# Altium footprint library HIL_project.PcbLib: 26 footprints (part 1 of 2)
Each footprint in its own frame and in the unit in brackets; x right, y up, seen from the top. Pads: shape width x height; smd on the part's side, far side on the other; paste and mask are expansions set on the pad; w line width, h text height; cw(c..) or ccw(c..) is an arc to the next point about the centre after c.
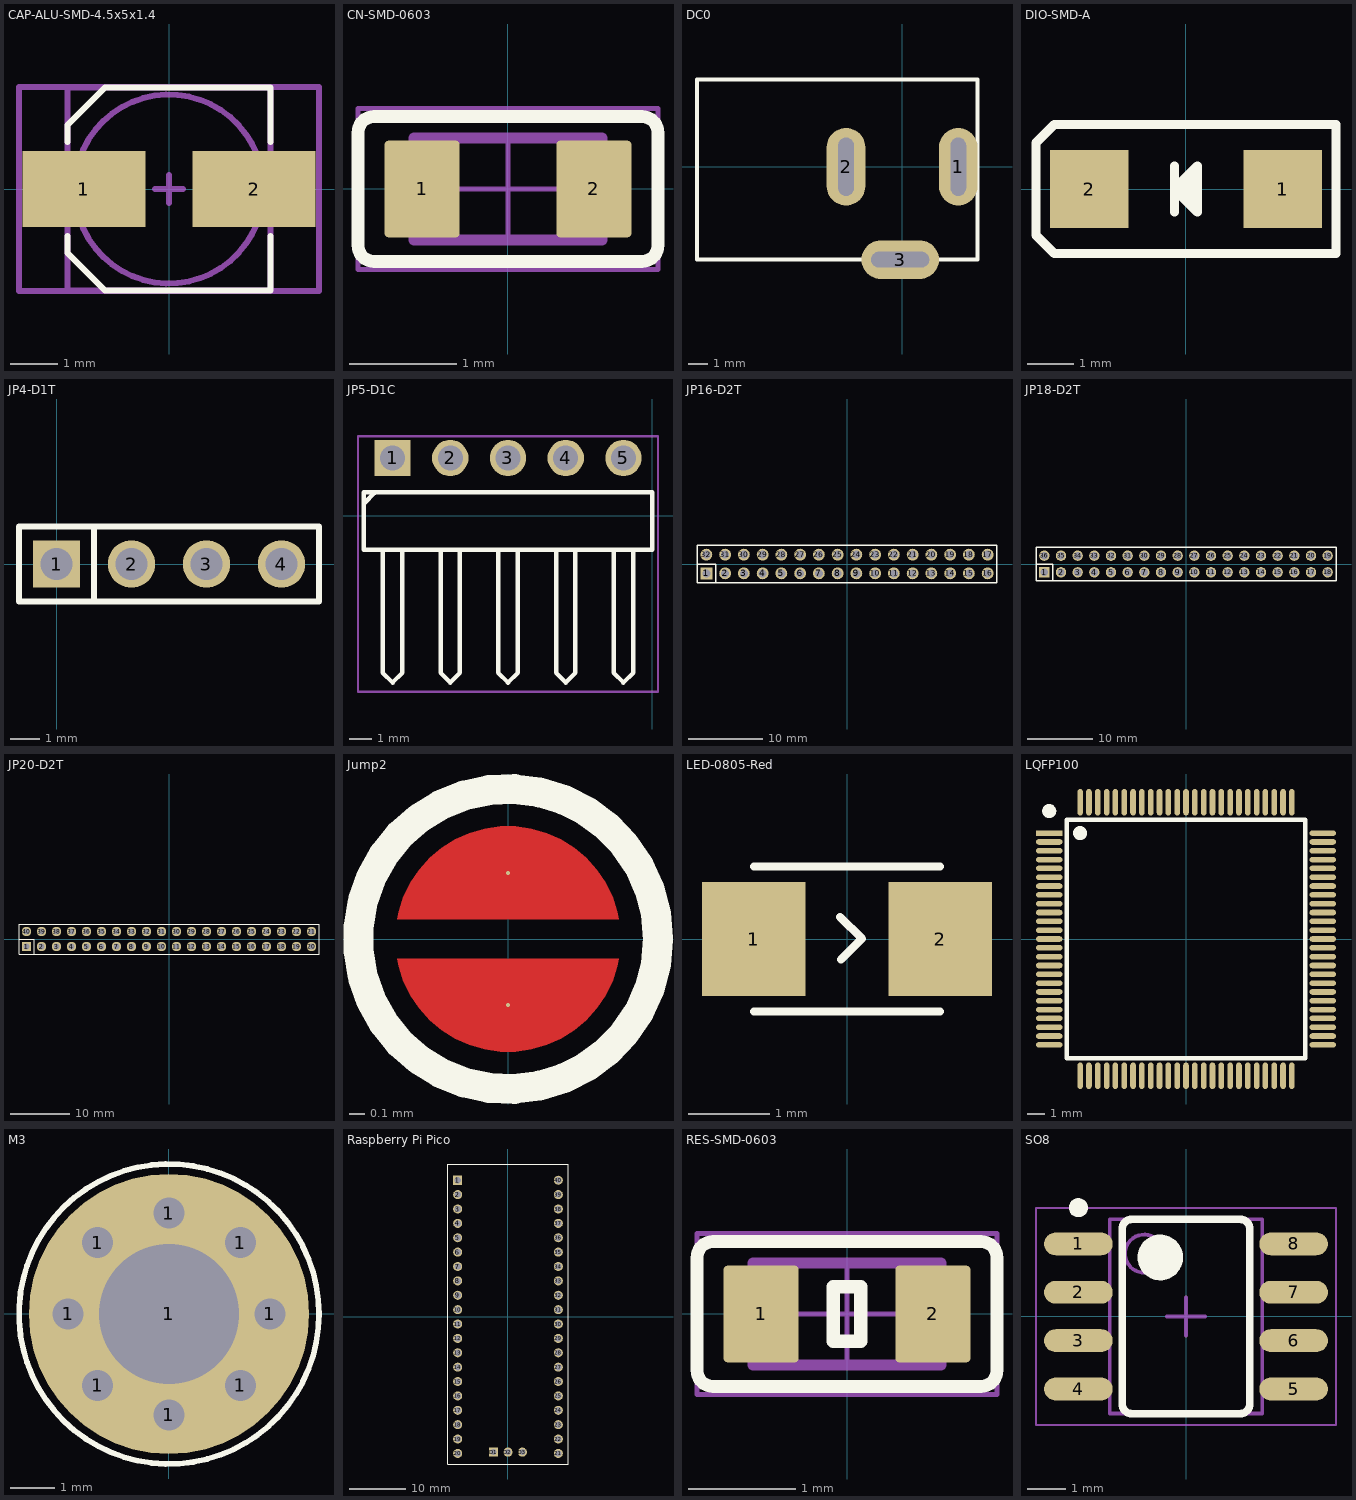
[diagram p0: the footprints below, top view; thin cyan lines are the x and y axes]

## CAP-ALU-SMD-4.5x5x1.4 [mm]
height 5.5
pads (2):
  rect 2.6x1.6 smd: 1(-1.8,0) 2(1.8,0)
Top Overlay:
  lines w0.127: -2.15,-1 -2.15,-1.35 -1.35,-2.15 2.15,-2.15 2.15,-1 ; -2.15,1 -2.15,1.35 -1.35,2.15 2.15,2.15 2.15,1
Mechanical 13:
  circle w0.127: c0,0 r2
  lines w0.127: -2.15,-2.15 -2.15,2.15 2.15,2.15 2.15,-2.15 -2.15,-2.15
Mechanical 15:
  lines w0.127: -0.3,0 0.3,0 ; 0,-0.3 0,0.3 ; -3.175,-2.159 -3.175,2.159 3.175,2.159 3.175,-2.159 -3.175,-2.159
3D body "4x5.5x1.stp": height 5.45, standoff -0.05, extent -2.5,-2.15 2.5,2.15

## CN-SMD-0603 [mm]
pads (2):
  rrect10% 0.7x0.9 smd: 1(-0.8,0) 2(0.8,0)
Top Overlay:
  lines w0.12: -1.397,-0.525 ccw(c-1.247,-0.525) -1.247,-0.675 1.247,-0.675 ccw(c1.247,-0.525) 1.397,-0.525 1.397,0.525 ccw(c1.247,0.525) 1.247,0.675 -1.247,0.675 ccw(c-1.247,0.525) -1.397,0.525 -1.397,-0.525
Mechanical 13:
  lines w0.1: -0.875,-0.475 0.875,-0.475 0.875,0.475 -0.875,0.475 -0.875,-0.475
Mechanical 15:
  lines w0.05: -0.475,0 0.475,0 ; 0,-0.475 0,0.475 ; -1.397,-0.75 1.397,-0.75 1.397,0.75 -1.397,0.75 -1.397,-0.75
3D body "User Library-0603 SMD Capacitor.step": height 0.3, standoff 0, extent -0.8,-0.4 0.8,0.4

## DC0 [mm] "Jac DC input"
height 5.08
pads (3):
  oval 2x4 hole 0.8 slot 3 at 90 deg: 1(2.9,0) 2(-2.9,0)
  oval 4x2 hole 0.8 slot 3 at 0 deg: 3(-0.1,-4.8)
Top Overlay:
  lines w0.2: -2.1,-4.8 -10.6,-4.8 -10.6,4.5 3.9,4.5 3.9,-4.8 1.9,-4.8
3D body "694106301002.stp": height 10.7, standoff -3.8, extent -10.6,-4.9 3.9,4.5

## DIO-SMD-A [mm]
pads (2):
  rect 1.7x1.7 smd: 1(2.1,0) 2(-2.1,0)
Top Overlay:
  region: 0.25,0.5 0.25,-0.5 -0.25,0
  lines w0.2: -0.25,-0.5 -0.25,0.5 ; -3.25,-1 -3.25,1 -2.85,1.4 3.25,1.4 3.25,-1.4 -2.85,-1.4 -3.25,-1 ; -0.25,0 0.25,0.5 0.25,-0.5 -0.25,0
Mechanical 1:
  lines w0.1: -0.2,0 0.2,0 ; 0,-0.2 0,0.2
3D body "User Library-DO-214Aa SMA.step": height 2.4, standoff 0, extent -2.6,-1.3 2.6,1.3

## JP4-D1T [mm] "4 pins, 1 row, straight, gold plating"
height 8.54
pads (4):
  rect 1.6x1.6 hole 1.1: 1(0,0)
  round 1.6 hole 1.1: 2(2.54,0) 3(5.08,0) 4(7.62,0)
Top Overlay:
  lines w0.2: 1.27,-1.27 1.27,1.27 ; -1.27,-1.27 -1.27,1.27 8.89,1.27 8.89,-1.27 -1.27,-1.27
3D body "61300411121.stp": height 8.54, standoff -3, extent -1.27,-1.27 8.89,1.27

## JP5-D1C [mm] "5 pins, 1 row, right angled, gold plating"
height 2.54
pads (5):
  rect 1.6x1.6 hole 1.1: 1(-11.43,2.54)
  round 1.6 hole 1.1: 2(-8.89,2.54) 3(-6.35,2.54) 4(-3.81,2.54) 5(-1.27,2.54)
Top Overlay:
  lines w0.2: -12.658,0.574 -12.234,0.998 ; -11.853,-1.525 -11.853,-6.919 -11.43,-7.342 -11.007,-6.919 -11.007,-1.5 ; -9.313,-1.525 -9.313,-6.919 -8.89,-7.342 -8.467,-6.919 -8.467,-1.525 ; -6.773,-1.525 -6.773,-6.919 -6.35,-7.342 -5.927,-6.919 -5.927,-1.5 ; -4.233,-1.525 -4.233,-6.919 -3.81,-7.342 -3.387,-6.919 -3.387,-1.525 ; -1.693,-1.525 -1.693,-6.919 -1.27,-7.342 -0.847,-6.919 -0.847,-1.5 ; -12.7,-1.5 0,-1.5 0,1.04 -12.7,1.04 -12.7,-1.5
Mechanical 15:
  lines w0.1: -12.95,-7.75 -12.95,3.5 0.25,3.5 0.25,-7.75 -12.95,-7.75
3D body "61300511021.stp": height 2.55, standoff -2.99, extent -12.7,-7.524 0,2.836

## JP16-D2T [mm] "32 pins, dual pin, straight, gold plating"
height 8.54
pads (32):
  rect 1.6x1.6 hole 1.1: 1(-19.05,-1.27)
  round 1.6 hole 1.1: 2(-16.51,-1.27) 3(-13.97,-1.27) 4(-11.43,-1.27) 5(-8.89,-1.27) 6(-6.35,-1.27) 7(-3.81,-1.27) 8(-1.27,-1.27) 9(1.27,-1.27) 10(3.81,-1.27) 11(6.35,-1.27) 12(8.89,-1.27) 13(11.43,-1.27) 14(13.97,-1.27) 15(16.51,-1.27) 16(19.05,-1.27) 17(19.05,1.27) 18(16.51,1.27) 19(13.97,1.27) 20(11.43,1.27) 21(8.89,1.27) 22(6.35,1.27) 23(3.81,1.27) 24(1.27,1.27) 25(-1.27,1.27) 26(-3.81,1.27) 27(-6.35,1.27) 28(-8.89,1.27) 29(-11.43,1.27) 30(-13.97,1.27) 31(-16.51,1.27) 32(-19.05,1.27)
Top Overlay:
  lines w0.2: -20.32,0 -17.78,0 -17.78,-2.54 ; -20.32,-2.54 -20.32,2.54 20.32,2.54 20.32,-2.54 -20.32,-2.54
3D body "61303221121.stp": height 8.55, standoff -2.99, extent -20.32,-2.54 20.32,2.54

## JP18-D2T [mm] "36 pins, dual pin, straight, gold plating"
height 8.54
pads (36):
  rect 1.6x1.6 hole 1.1: 1(-21.59,-1.27)
  round 1.6 hole 1.1: 2(-19.05,-1.27) 3(-16.51,-1.27) 4(-13.97,-1.27) 5(-11.43,-1.27) 6(-8.89,-1.27) 7(-6.35,-1.27) 8(-3.81,-1.27) 9(-1.27,-1.27) 10(1.27,-1.27) 11(3.81,-1.27) 12(6.35,-1.27) 13(8.89,-1.27) 14(11.43,-1.27) 15(13.97,-1.27) 16(16.51,-1.27) 17(19.05,-1.27) 18(21.59,-1.27) 19(21.59,1.27) 20(19.05,1.27) 21(16.51,1.27) 22(13.97,1.27) 23(11.43,1.27) 24(8.89,1.27) 25(6.35,1.27) 26(3.81,1.27) 27(1.27,1.27) 28(-1.27,1.27) 29(-3.81,1.27) 30(-6.35,1.27) 31(-8.89,1.27) 32(-11.43,1.27) 33(-13.97,1.27) 34(-16.51,1.27) 35(-19.05,1.27) 36(-21.59,1.27)
Top Overlay:
  lines w0.2: -22.86,0 -20.32,0 -20.32,-2.54 ; -22.86,-2.54 -22.86,2.54 22.86,2.54 22.86,-2.54 -22.86,-2.54
3D body "61303621121.stp": height 8.55, standoff -2.99, extent -22.86,-2.54 22.86,2.54

## JP20-D2T [mm] "40 pins, dual pin, straight, gold plating"
height 8.54
pads (40):
  rect 1.6x1.6 hole 1.1: 1(-24.13,-1.27)
  round 1.6 hole 1.1: 2(-21.59,-1.27) 3(-19.05,-1.27) 4(-16.51,-1.27) 5(-13.97,-1.27) 6(-11.43,-1.27) 7(-8.89,-1.27) 8(-6.35,-1.27) 9(-3.81,-1.27) 10(-1.27,-1.27) 11(1.27,-1.27) 12(3.81,-1.27) 13(6.35,-1.27) 14(8.89,-1.27) 15(11.43,-1.27) 16(13.97,-1.27) 17(16.51,-1.27) 18(19.05,-1.27) 19(21.59,-1.27) 20(24.13,-1.27) 21(24.13,1.27) 22(21.59,1.27) 23(19.05,1.27) 24(16.51,1.27) 25(13.97,1.27) 26(11.43,1.27) 27(8.89,1.27) 28(6.35,1.27) 29(3.81,1.27) 30(1.27,1.27) 31(-1.27,1.27) 32(-3.81,1.27) 33(-6.35,1.27) 34(-8.89,1.27) 35(-11.43,1.27) 36(-13.97,1.27) 37(-16.51,1.27) 38(-19.05,1.27) 39(-21.59,1.27) 40(-24.13,1.27)
Top Overlay:
  lines w0.2: -25.4,0 -22.86,0 -22.86,-2.54 ; -25.4,-2.54 25.4,-2.54 25.4,2.54 -25.4,2.54 -25.4,-2.54
3D body "61304021121.stp": height 8.55, standoff -2.99, extent -25.4,-2.54 25.4,2.54

## Jump2 [mil]
pads (2):
  round 1 smd: 1(0,17.33) 2(0,-17.33)
Top Layer:
  region: -29.08,5.13 -28.72,7.16 -27.44,11.09 -25.63,14.8 -23.32,18.22 -20.56,21.29 -17.4,23.95 -13.9,26.13 -10.12,27.81 -6.15,28.95 -2.06,29.53 2.06,29.53 6.15,28.95 10.12,27.81 13.9,26.13 17.4,23.95 20.56,21.29 23.32,18.22 25.63,14.8 27.44,11.09 28.72,7.16 29.08,5.13
  region: 29.08,-5.13 28.72,-7.16 27.44,-11.09 25.63,-14.8 23.32,-18.22 20.56,-21.29 17.4,-23.95 13.9,-26.13 10.12,-27.81 6.15,-28.95 2.06,-29.53 -2.06,-29.53 -6.15,-28.95 -10.12,-27.81 -13.9,-26.13 -17.4,-23.95 -20.56,-21.29 -23.32,-18.22 -25.63,-14.8 -27.44,-11.09 -28.72,-7.16 -29.08,-5.13
Top Overlay:
  circle w7.87: c0,0 r39.37

## LED-0805-Red [mil]
pads (2):
  rect 50x55 smd: 1(-45,0) 2(45,0)
Top Overlay:
  lines w3.94: -3.34,10.66 7.16,0.16 ; -2.91,-9.91 6.91,-0.09
  lines w4: -45,-35 45,-35 ; -45,35 45,35
3D body "User Library-led_0805-red.step": height 43.31, standoff 0, extent -39.76,-24.6 39.77,24.61

## LQFP100 [mm]
pads (100):
  rect 1.5x0.32 smd: 1(-7.75,6)
  oval 1.5x0.32 smd: 2(-7.75,5.5) 3(-7.75,5) 4(-7.75,4.5) 5(-7.75,4) 6(-7.75,3.5) 7(-7.75,3) 8(-7.75,2.5) 9(-7.75,2) 10(-7.75,1.5) 11(-7.75,1) 12(-7.75,0.5) 13(-7.75,0) 14(-7.75,-0.5) 15(-7.75,-1) 16(-7.75,-1.5) 17(-7.75,-2) 18(-7.75,-2.5) 19(-7.75,-3) 20(-7.75,-3.5) 21(-7.75,-4) 22(-7.75,-4.5) 23(-7.75,-5) 24(-7.75,-5.5) 25(-7.75,-6) 51(7.75,-6) 52(7.75,-5.5) 53(7.75,-5) 54(7.75,-4.5) 55(7.75,-4) 56(7.75,-3.5) 57(7.75,-3) 58(7.75,-2.5) 59(7.75,-2) 60(7.75,-1.5) 61(7.75,-1) 62(7.75,-0.5) 63(7.75,0) 64(7.75,0.5) 65(7.75,1) 66(7.75,1.5) 67(7.75,2) 68(7.75,2.5) 69(7.75,3) 70(7.75,3.5) 71(7.75,4) 72(7.75,4.5) 73(7.75,5) 74(7.75,5.5) 75(7.75,6)
  oval 0.32x1.5 smd: 26(-6,-7.75) 27(-5.5,-7.75) 28(-5,-7.75) 29(-4.5,-7.75) 30(-4,-7.75) 31(-3.5,-7.75) 32(-3,-7.75) 33(-2.5,-7.75) 34(-2,-7.75) 35(-1.5,-7.75) 36(-1,-7.75) 37(-0.5,-7.75) 38(0,-7.75) 39(0.5,-7.75) 40(1,-7.75) 41(1.5,-7.75) 42(2,-7.75) 43(2.5,-7.75) 44(3,-7.75) 45(3.5,-7.75) 46(4,-7.75) 47(4.5,-7.75) 48(5,-7.75) 49(5.5,-7.75) 50(6,-7.75) 76(6,7.75) 77(5.5,7.75) 78(5,7.75) 79(4.5,7.75) 80(4,7.75) 81(3.5,7.75) 82(3,7.75) 83(2.5,7.75) 84(2,7.75) 85(1.5,7.75) 86(1,7.75) 87(0.5,7.75) 88(0,7.75) 89(-0.5,7.75) 90(-1,7.75) 91(-1.5,7.75) 92(-2,7.75) 93(-2.5,7.75) 94(-3,7.75) 95(-3.5,7.75) 96(-4,7.75) 97(-4.5,7.75) 98(-5,7.75) 99(-5.5,7.75) 100(-6,7.75)
Top Overlay:
  circle w0.4: c-7.75,7.25 r0.2
  circle w0.4: c-6,6 r0.2
  lines w0.254: -6.75,-6.75 6.75,-6.75 6.75,6.75 -6.75,6.75 -6.75,-6.75
3D body "step_temp.STEP": height 1.6, standoff 0, extent -8,-8 8,8

## M3 [mm]
pads (9):
  round 1 hole 0.7: 1(-2.286,0) 1(-1.616,-1.616) 1(-1.616,1.616) 1(0,-2.286) 1(0,2.286) 1(1.616,-1.616) 1(1.616,1.616) 1(2.286,0)
  round 6.35 hole 3.18: 1(0,0)
Top Overlay:
  circle w0.127: c0,0 r3.4
Bottom Overlay:
  circle w0.127: c0,0 r3.4

## Raspberry Pi Pico [mm]
pads (43):
  rect 1.6x1.6 hole 1.1: 1(-8.89,24.13) D1(-2.54,-23.9)
  round 1.6 hole 1.1: 2(-8.89,21.59) 3(-8.89,19.05) 4(-8.89,16.51) 5(-8.89,13.97) 6(-8.89,11.43) 7(-8.89,8.89) 8(-8.89,6.35) 9(-8.89,3.81) 10(-8.89,1.27) 11(-8.89,-1.27) 12(-8.89,-3.81) 13(-8.89,-6.35) 14(-8.89,-8.89) 15(-8.89,-11.43) 16(-8.89,-13.97) 17(-8.89,-16.51) 18(-8.89,-19.05) 19(-8.89,-21.59) 20(-8.89,-24.13) 21(8.89,-24.13) 22(8.89,-21.59) 23(8.89,-19.05) 24(8.89,-16.51) 25(8.89,-13.97) 26(8.89,-11.43) 27(8.89,-8.89) 28(8.89,-6.35) 29(8.89,-3.81) 30(8.89,-1.27) 31(8.89,1.27) 32(8.89,3.81) 33(8.89,6.35) 34(8.89,8.89) 35(8.89,11.43) 36(8.89,13.97) 37(8.89,16.51) 38(8.89,19.05) 39(8.89,21.59) 40(8.89,24.13) D2(0,-23.9) D3(2.54,-23.9)
Top Overlay:
  lines w0.2: -10.65,-26 10.65,-26 10.65,27 -10.65,27 -10.65,-26
3D body "61300311821.stp": height 8.51, standoff -3.09, extent -4.06,-25.15 4.06,-22.65
3D body "61302011821.stp": height 8.51, standoff -3.09, extent 7.64,-25.65 10.14,25.65
3D body "61302011121.stp": height 14.07, standoff 2.53, extent -10.16,-25.4 -7.62,25.4
3D body "rpi_pico2.step": height 14.79, standoff 11.02, extent -10.5,-25.5 10.5,26.8
3D body "61302011121.stp": height 14.07, standoff 2.53, extent 7.62,-25.4 10.16,25.4
3D body "61302011821.stp": height 8.51, standoff -3.09, extent -10.14,-25.65 -7.64,25.65
3D body "61300311121.stp": height 14.07, standoff 2.53, extent -3.81,-25.17 3.81,-22.63

## RES-SMD-0603 [mm]
pads (2):
  rrect10% 0.7x0.9 smd: 1(-0.8,0) 2(0.8,0)
Top Overlay:
  lines w0.12: -1.397,-0.525 ccw(c-1.247,-0.525) -1.247,-0.675 1.247,-0.675 ccw(c1.247,-0.525) 1.397,-0.525 1.397,0.525 ccw(c1.247,0.525) 1.247,0.675 -1.247,0.675 ccw(c-1.247,0.525) -1.397,0.525 -1.397,-0.525
  lines w0.127: -0.127,-0.254 0.127,-0.254 0.127,0.254 -0.127,0.254 -0.127,-0.254
Mechanical 13:
  lines w0.1: -0.875,-0.475 -0.875,0.475 0.875,0.475 0.875,-0.475 -0.875,-0.475
Mechanical 15:
  lines w0.05: -0.475,0 0.475,0 ; 0,-0.475 0,0.475 ; -1.397,-0.75 -1.397,0.75 1.397,0.75 1.397,-0.75 -1.397,-0.75
3D body "User Library-SMD RESISTOR-1 (3).step": height 0.43, standoff -0.03, extent -0.8,-0.4 0.8,0.4

## SO8 [mm] "SOIC, 8-Leads, Body 4.9x3.9mm, Pitch 1.27mm, IPC High Density"
pads (8):
  oval 1.8x0.6 smd: 1(-2.825,1.905) 2(-2.825,0.635) 3(-2.825,-0.635) 4(-2.825,-1.905) 5(2.825,-1.905) 6(2.825,-0.635) 7(2.825,0.635) 8(2.825,1.905)
Top Overlay:
  circle w0.6: c-0.675,1.55 r0.3
  circle w0.25: c-2.825,2.855 r0.125
  lines w0.2: -1.675,-2.296 ccw(c-1.421,-2.296) -1.421,-2.55 1.421,-2.55 ccw(c1.421,-2.296) 1.675,-2.296 1.675,2.296 ccw(c1.421,2.296) 1.421,2.55 -1.421,2.55 ccw(c-1.421,2.296) -1.675,2.296 -1.675,-2.296
Mechanical 13:
  circle w0.1: c-1.1,1.65 r0.5
  lines w0.1: -2,-2.55 2,-2.55 2,2.55 -2,2.55 -2,-2.55
Mechanical 15:
  lines w0.05: -3.937,-2.85 3.937,-2.85 3.937,2.85 -3.937,2.85 -3.937,-2.85
  lines w0.1: -0.5,0 0.5,0 ; 0,-0.5 0,0.5
3D body "CircuitWorks-SO-8 (PIC12FXXX).step": height 1.6, standoff 0, extent -2.995,-2.45 2.995,2.45